# Altium schematic symbol library S-2050.SchLib: 1 symbol
Pins are listed as number, name and electrical type; pins without a type are passive.

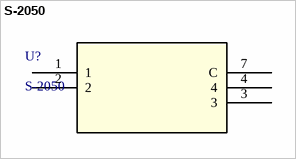
[diagram p0: symbol S-2050]

## S-2050
designator U?
Description; Manufacturer_Name: Nidec Copal Electronics; Copyright: Copyright (C) 2025 Ultra Librarian. All rights reserved.; Manufacturer_Part_Number: S-2050; RefDes: RefDes; Type: Type
footprint S-2050_NDC
pins: 1, 2, 3, 4, 7 C